# Altium footprint library MY_LIB_NetTie.PcbLib: 1 footprints
Each footprint in its own frame and in the unit in brackets; x right, y up, seen from the top. Pads: shape width x height; smd on the part's side, far side on the other; paste and mask are expansions set on the pad; w line width, h text height; cw(c..) or ccw(c..) is an arc to the next point about the centre after c.
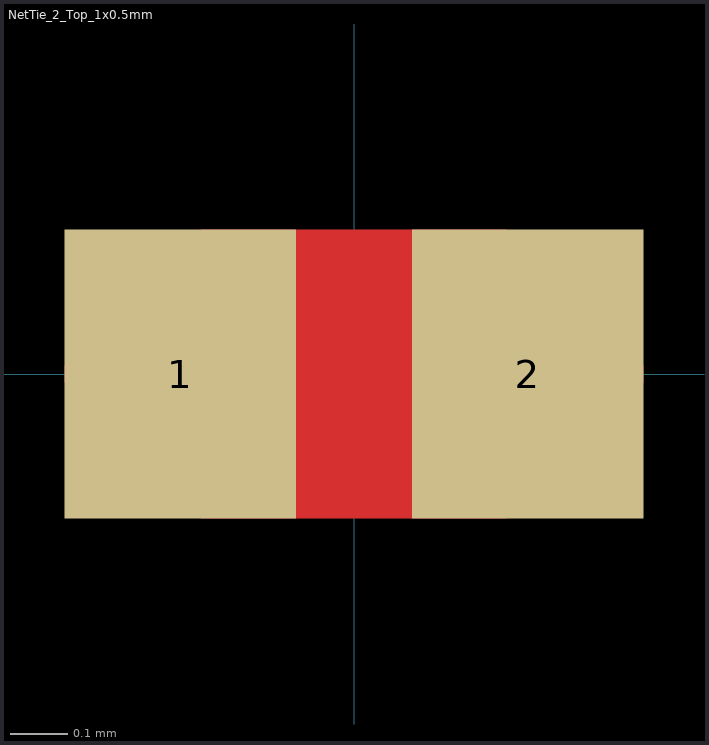
[diagram p0: the footprint, top view; thin cyan lines are the x and y axes]

## NetTie_2_Top_1x0.5mm [mm] "Two-net copper tie on the PCB"
pads (2):
  rect 0.4x0.5 smd paste-0.5 mask-0.5: 1(-0.3,0) 2(0.3,0)
Top Layer:
  lines w0.5: -0.25,0 0.25,0